# Altium integrated library Y_Cap.IntLib: 1 symbol
Pins are listed as number, name and electrical type; pins without a type are passive.

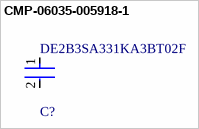
[diagram p0: symbol CMP-06035-005918-1]

## CMP-06035-005918-1
designator C?, comment DE2B3SA331KA3BT02F
Cap Ceramic Disc 330pF 10% 250VAC Thru-Hole 6.0x4.0x7.5 Bulk
footprint FP-DE2_D6_T4_F7_5_d0_6-0-MFG
pins: 1, 2